# Altium schematic symbol library Conn,FPC,RA,0.5mm,HC-FPC-0.5-8P-FH20.Schlib: 1 symbol
Pins are listed as number, name and electrical type; pins without a type are passive.

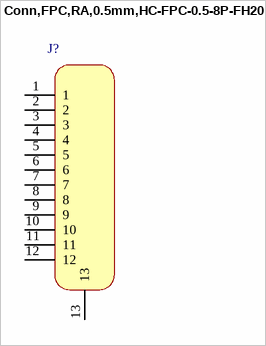
[diagram p0: symbol Conn,FPC,RA,0.5mm,HC-FPC-0.5-8P-FH20]

## Conn,FPC,RA,0.5mm,HC-FPC-0.5-8P-FH20
designator J?
pins: 1, 2, 3, 4, 5, 6, 7, 8, 9, 10, 11, 12, 13